# Altium footprint library Regulator$.PcbLib: 106 footprints (part 5 of 7)
Each footprint in its own frame and in the unit in brackets; x right, y up, seen from the top. Pads: shape width x height; smd on the part's side, far side on the other; paste and mask are expansions set on the pad; w line width, h text height; cw(c..) or ccw(c..) is an arc to the next point about the centre after c.
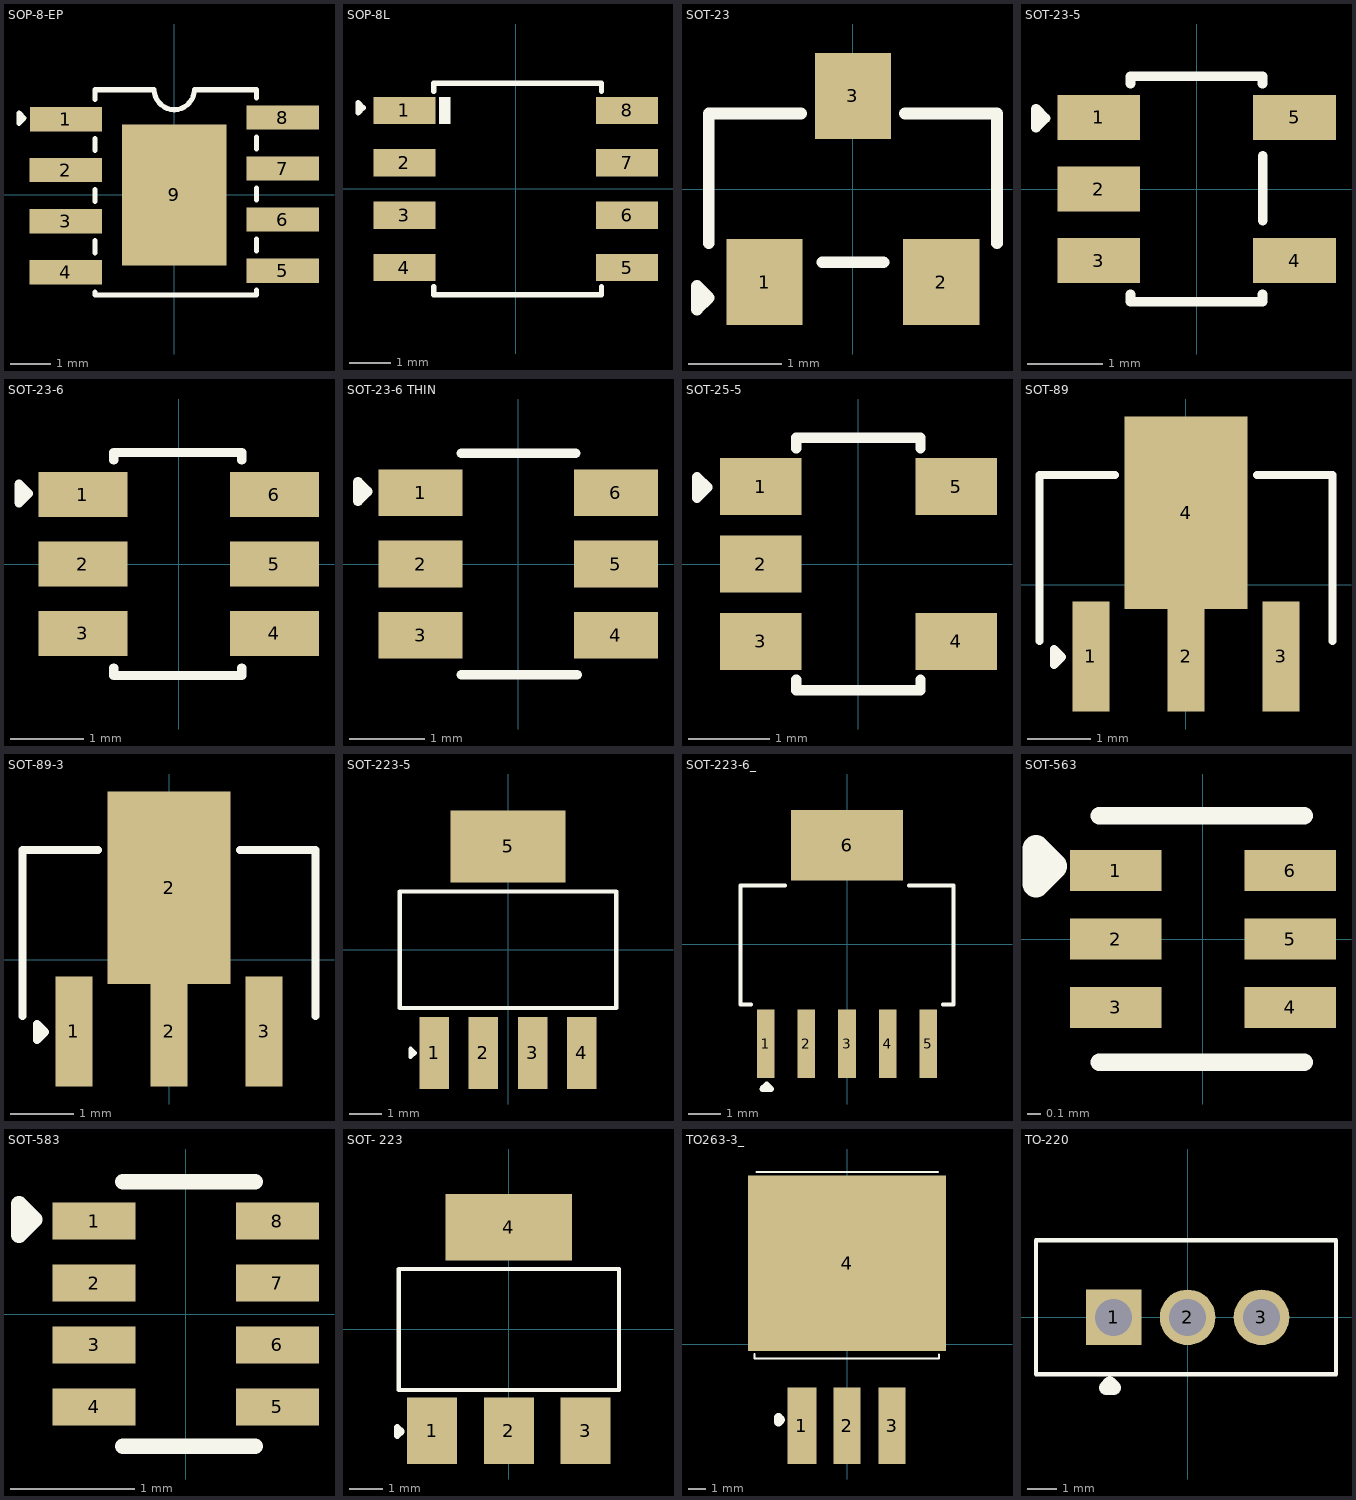
[diagram p4: the footprints below, top view; thin cyan lines are the x and y axes]

## SOP-8-EP [mm]
pads (9):
  rect 1.8x0.6 smd paste+0 mask+0.051: 1(-2.692,1.883) 2(-2.7,0.616) 3(-2.7,-0.654) 4(-2.7,-1.924) 5(2.7,-1.886) 6(2.7,-0.616) 7(2.7,0.654) 8(2.7,1.924)
  rect 2.6x3.5 smd paste+0 mask+0.051: 9(0,0)
Top Overlay:
  lines w0.127: -1.975,-2.485 -1.975,-2.41 ; -1.975,-1.438 -1.975,-1.14 ; -1.975,-0.168 -1.975,0.13 ; -1.975,1.102 -1.975,1.397 ; -1.975,2.37 -1.975,2.615 -0.5,2.615 ; -1.955,-2.485 2.045,-2.485 2.045,-2.372 ; -0.499,2.615 ccw(c0.001,2.618) 0.5,2.615 2.045,2.615 2.045,2.41 ; 2.045,-1.4 2.045,-1.102 ; 2.045,-0.13 2.045,0.168 ; 2.045,1.14 2.045,1.438 ; -3.861,1.781 -3.861,2.035 -3.734,1.908 -3.861,1.781
3D body "AP64501SP-13.STEP": height 1.7, standoff 0, extent -3,-2.45 3,2.45

## SOP-8L [mm]
pads (8):
  rect 1.5x0.66 smd: 1(-2.7,1.905) 2(-2.7,0.635) 3(-2.7,-0.635) 4(-2.7,-1.905) 5(2.7,-1.905) 6(2.7,-0.635) 7(2.7,0.635) 8(2.7,1.905)
Top Overlay:
  rectangle: -1.855,1.575 -1.576,2.235
  lines w0.127: -1.986,-2.362 -1.986,-2.565 2.078,-2.565 2.078,-2.362 ; -1.986,2.362 -1.986,2.565 2.078,2.565 2.078,2.362 ; -3.823,1.841 -3.823,2.095 -3.696,1.968 -3.823,1.841
3D body "TRANS_IRF7103TRPBF_INF.step": height 1.76, standoff 0, extent -3.099,-2.502 3.099,2.502

## SOT-23 [mm] "TRANS NPN 40V 0.6A SOT23"
pads (3):
  rect 0.82x0.92 smd: 1(-0.95,-1) 2(0.95,-1) 3(0,1)
Top Overlay:
  lines w0.127: -1.549,-0.584 -1.549,0.813 -0.559,0.813 ; -0.33,-0.787 0.33,-0.787 ; 0.559,0.813 1.549,0.813 1.549,-0.584 ; -1.676,-1.295 -1.676,-1.041 -1.549,-1.168 -1.676,-1.295
3D body "CircuitWorks-SOT-23.step": height 1.05, standoff -0.05, extent -1.5,-1.25 1.5,1.25

## SOT-23-5 [mm]
pads (5):
  rect 1.1x0.6 smd: 1(-1.3,0.95) 2(-1.3,0) 3(-1.3,-0.95) 4(1.3,-0.95) 5(1.3,0.95)
Top Overlay:
  lines w0.127: -0.879,-1.399 -0.879,-1.499 0.874,-1.499 0.874,-1.399 ; -0.879,1.399 -0.879,1.499 0.874,1.499 0.874,1.399 ; 0.88,-0.418 0.88,0.44 ; -2.134,0.813 -2.007,0.94 -2.134,1.067 -2.134,0.813
3D body "SN74LV1T34DBVR.STEP": height 1.45, standoff 0, extent -1.4,-1.45 1.4,1.45

## SOT-23-6 [mm]
pads (6):
  rect 1.22x0.62 smd: 1(-1.31,0.95) 2(-1.31,0) 3(-1.31,-0.95) 4(1.31,-0.95) 5(1.31,0) 6(1.31,0.95)
Top Overlay:
  lines w0.127: -0.889,-1.424 -0.889,-1.524 0.864,-1.524 0.864,-1.424 ; -0.889,1.424 -0.889,1.524 0.864,1.524 0.864,1.424 ; -2.184,0.838 -2.057,0.965 -2.184,1.092 -2.184,0.838
3D body "21-0058I_MXM.step": height 1.47, standoff 0.02, extent -1.499,-1.499 1.499,1.499

## SOT-23-6 THIN [mm]
pads (6):
  rect 1.12x0.62 smd: 1(-1.3,0.95) 2(-1.3,0) 3(-1.3,-0.95) 4(1.3,-0.95) 5(1.3,0) 6(1.3,0.95)
Top Overlay:
  lines w0.127: -0.762,-1.473 0.787,-1.473 ; -0.762,1.473 0.762,1.473 ; -2.134,0.838 -2.007,0.965 -2.134,1.092 -2.134,0.838
3D body "User Library-SOT23-6-2.step": height 1.44, standoff -0.01, extent -1.4,-1.45 1.4,1.45

## SOT-25-5 [mm]
pads (5):
  rect 1x0.7 smd: 1(-1.2,0.95) 2(-1.2,0) 3(-1.2,-0.95) 4(1.2,-0.95) 5(1.2,0.95)
Top Overlay:
  lines w0.127: -0.762,-1.422 -0.762,-1.549 0.762,-1.549 0.762,-1.422 ; -0.762,1.422 -0.762,1.549 0.762,1.549 0.762,1.422 ; -1.981,0.813 -1.981,1.067 -1.854,0.94 -1.981,0.813
3D body "User Library-sot25.step": height 1.1, standoff -0.05, extent -1.194,-1.5 1.206,1.5

## SOT-89 [mm]
pads (4):
  rect 0.58x1.73 smd: 1(-1.5,-1.132) 2(0,-1.132) 3(1.5,-1.132)
  rect 1.933x3.03 smd: 4(0,1.132)
Top Overlay:
  lines w0.127: -2.311,-0.889 -2.311,1.727 -1.118,1.727 ; 1.118,1.727 2.311,1.727 2.311,-0.889 ; -2.083,-1.27 -1.956,-1.143 -2.083,-1.016 -2.083,-1.27
3D body "User Library-SOT89-3.STEP": height 1.54, standoff 0, extent -2.25,-1.844 2.25,2.406

## SOT-89-3 [mm]
pads (4):
  rect 0.58x1.73 smd: 1(-1.5,-1.132) 2(0,-1.132) 3(1.5,-1.132)
  rect 1.933x3.03 smd: 2(0,1.132)
Top Overlay:
  lines w0.127: -2.311,-0.889 -2.311,1.727 -1.118,1.727 ; 1.118,1.727 2.311,1.727 2.311,-0.889 ; -2.083,-1.27 -2.083,-1.016 -1.956,-1.143 -2.083,-1.27
3D body "User Library-SOT89-3.STEP": height 1.54, standoff 0, extent -2.25,-1.844 2.25,2.406

## SOT-223-5 [mm]
pads (5):
  rect 0.9x2.2 smd paste+0 mask+0.051: 1(-2.25,-3.15) 2(-0.75,-3.15) 3(0.75,-3.15) 4(2.25,-3.15)
  rect 3.5x2.2 smd paste+0 mask+0.051: 5(0,3.15)
Top Overlay:
  lines w0.127: -3.302,-1.778 -3.302,1.778 3.302,1.778 3.302,-1.778 -3.302,-1.778 ; -2.972,-3.277 -2.845,-3.15 -2.972,-3.023 -2.972,-3.277
3D body "LP38692MP-5.0.step": height 1.8, standoff 0, extent -3.25,-3.521 3.25,3.521

## SOT-223-6_ [mm]
pads (6):
  rect 0.55x2.15 smd: 1(-2.54,-3.1) 2(-1.27,-3.1) 3(0,-3.1) 4(1.27,-3.1) 5(2.54,-3.1)
  rect 3.5x2.2 smd: 6(0,3.1)
Top Overlay:
  lines w0.127: -2.991,-1.873 -3.327,-1.873 -3.327,1.84 -1.929,1.84 ; 1.929,1.84 3.327,1.84 3.327,-1.873 2.991,-1.873
  lines w0.2: -2.636,-4.513 -2.382,-4.513 -2.509,-4.386 -2.636,-4.513
3D body "User Library-SOT-223-6.STEP": height 1.8, standoff 0, extent -3.275,-3.63 3.275,3.63

## SOT-563 [mm]
pads (6):
  rect 0.67x0.3 smd mask+0.07: 1(-0.638,0.5) 2(-0.638,0) 3(-0.638,-0.5) 4(0.638,-0.5) 5(0.638,0) 6(0.638,0.5)
Top Overlay:
  lines w0.127: -0.759,-0.902 0.741,-0.902 ; -0.759,0.902 0.741,0.902
  lines w0.2: -1.22,0.405 -1.22,0.659 -1.093,0.532 -1.22,0.405
3D body "SOT_X-T1-GE3_VIS.step": height 0.61, standoff 0, extent -0.851,-0.851 0.851,0.851

## SOT-583 [mm]
pads (8):
  rect 0.67x0.3 smd: 1(-0.74,0.75) 2(-0.74,0.25) 3(-0.74,-0.25) 4(-0.74,-0.75) 5(0.74,-0.75) 6(0.74,-0.25) 7(0.74,0.25) 8(0.74,0.75)
Top Overlay:
  lines w0.127: -0.508,-1.067 0.559,-1.067 ; -0.508,1.067 0.559,1.067 ; -1.346,0.635 -1.219,0.762 -1.346,0.889 -1.346,0.635
3D body "MP2182GTL-Z--3DModel-STEP-56544.STEP": height 0.6, standoff 0, extent -0.8,-1.05 0.8,1.05

## SOT- 223 [mm]
pads (4):
  rect 1.5x2 smd: 1(-2.3,-3.05) 2(0,-3.05) 3(2.3,-3.05)
  rect 3.8x2 smd: 4(0,3.05)
Top Overlay:
  lines w0.127: -3.302,-1.829 -3.302,1.803 3.302,1.803 3.302,-1.829 -3.302,-1.829
  lines w0.2: -3.353,-3.2 -3.353,-2.946 -3.226,-3.073 -3.353,-3.2
3D body "User Library-SOT-223-1.step": height 1.61, standoff -0.04, extent -3.25,-3.5 3.25,3.5

## TO263-3_ [mil]
pads (4):
  rect 64x170 smd: 1(-100,-180)
  rect 60x170 smd: 2(0,-180) 3(100,-180)
  rect 440x390 smd: 4(0,180)
Top Overlay:
  lines w5: -205,-22 -205,-31 204,-31 204,-23 ; -200,382 201,382
  lines w19.68: -152,-172 -152,-162 -147,-167 -152,-172
3D body "User Library-TO-263-3 (1).step": height 181.1, standoff 0, extent -202.75,-214.97 202.76,379.52

## TO-220 [mm]
pads (3):
  rect 1.91x1.91 hole 1.27: 1(-2.54,0)
  round 1.91 hole 1.27: 2(0,0) 3(2.54,0)
Top Overlay:
  lines w0.152: -5.207,-1.958 5.1,-1.958 5.1,2.642 -5.207,2.642 -5.207,-1.958
  lines w0.5: -2.794,-2.413 -2.54,-2.413 -2.667,-2.286 -2.794,-2.413
3D body "L7805ABV.STEP": height 22.72, standoff -7.86, extent -5.15,-1.905 5.15,2.667